# Altium footprint library Connectors_HS.PcbLib: 19 footprints (part 1 of 2)
Each footprint in its own frame and in the unit in brackets; x right, y up, seen from the top. Pads: shape width x height; smd on the part's side, far side on the other; paste and mask are expansions set on the pad; w line width, h text height; cw(c..) or ccw(c..) is an arc to the next point about the centre after c.
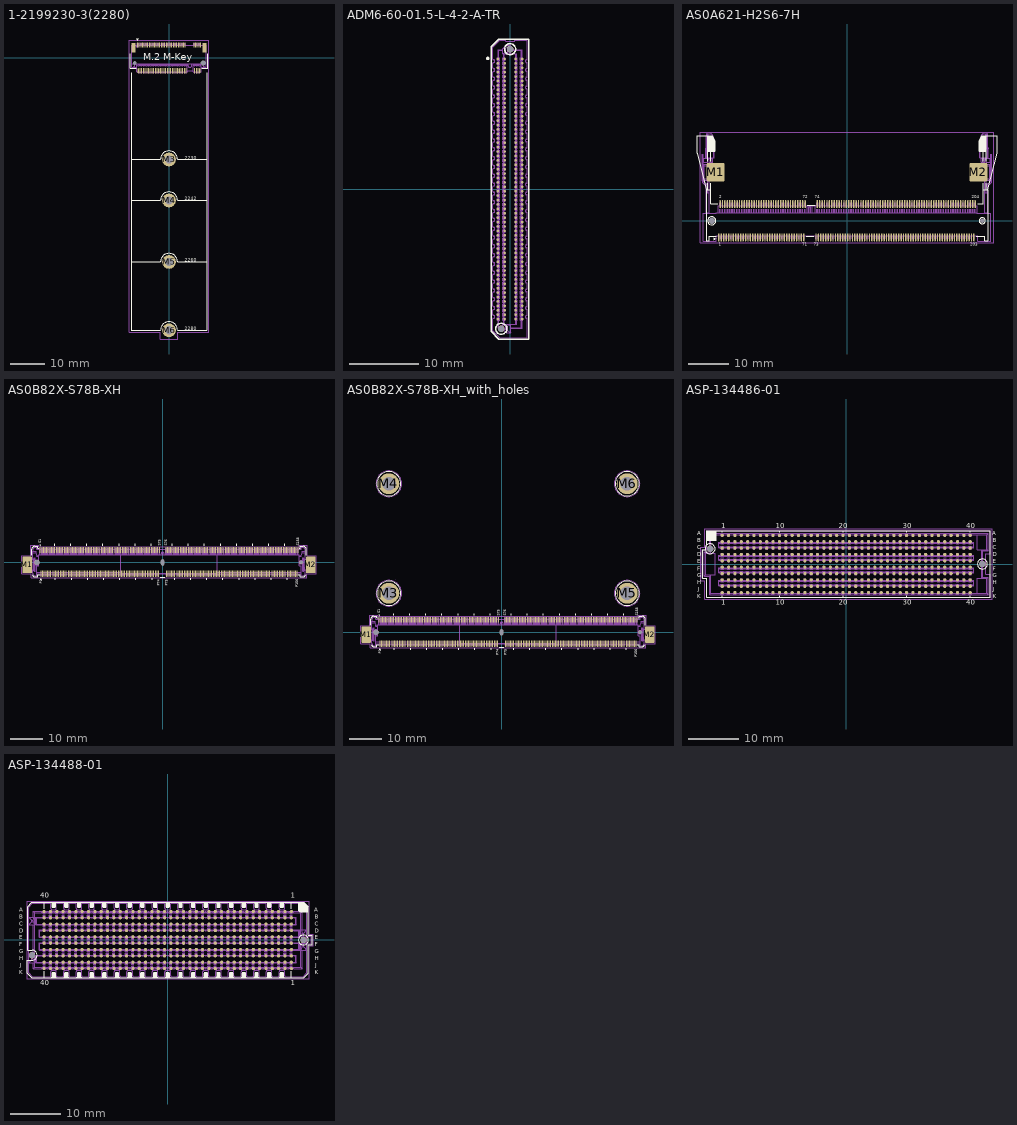
[diagram p0: the footprints below, top view; thin cyan lines are the x and y axes]

## 1-2199230-3(2280) [mm] "TE Conn M.2 M-Key"
height 4.2
pads (75):
  rect 0x0 hole 1.1 unplated paste-2539.97 mask+0.05: 0(-10,-1.5)
  rect 0x0 hole 1.6 unplated paste-2539.97 mask+0.05: 0(10,-1.5)
  rect 0.3x1.55 smd paste+0 mask+0.05: 1(-9.25,3.775)
  oval 0.3x1.55 smd paste+0 mask+0.05: 2(-9,-3.775) 3(-8.75,3.775) 4(-8.5,-3.775) 5(-8.25,3.775) 6(-8,-3.775) 7(-7.75,3.775) 8(-7.5,-3.775) 9(-7.25,3.775) 10(-7,-3.775) 11(-6.75,3.775) 12(-6.5,-3.775) 13(-6.25,3.775) 14(-6,-3.775) 15(-5.75,3.775) 16(-5.5,-3.775) 17(-5.25,3.775) 18(-5,-3.775) 19(-4.75,3.775) 20(-4.5,-3.775) 21(-4.25,3.775) 22(-4,-3.775) 23(-3.75,3.775) 24(-3.5,-3.775) 25(-3.25,3.775) 26(-3,-3.775) 27(-2.75,3.775) 28(-2.5,-3.775) 29(-2.25,3.775) 30(-2,-3.775) 31(-1.75,3.775) 32(-1.5,-3.775) 33(-1.25,3.775) 34(-1,-3.775) 35(-0.75,3.775) 36(-0.5,-3.775) 37(-0.25,3.775) 38(0,-3.775) 39(0.25,3.775) 40(0.5,-3.775) 41(0.75,3.775) 42(1,-3.775) 43(1.25,3.775) 44(1.5,-3.775) 45(1.75,3.775) 46(2,-3.775) 47(2.25,3.775) 48(2.5,-3.775) 49(2.75,3.775) 50(3,-3.775) 51(3.25,3.775) 52(3.5,-3.775) 53(3.75,3.775) 54(4,-3.775) 55(4.25,3.775) 56(4.5,-3.775) 57(4.75,3.775) 58(5,-3.775) 67(7.25,3.775) 68(7.5,-3.775) 69(7.75,3.775) 70(8,-3.775) 71(8.25,3.775) 72(8.5,-3.775) 73(8.75,3.775) 74(9,-3.775) 75(9.25,3.775)
  rect 1.2x2.75 smd paste+0 mask+0.05: M1(-10.35,3) M2(10.35,3)
  round 4 hole 2.4 paste-2539.97 mask+0.05: M3(0,-29.75) M4(0,-41.75) M5(0,-59.75) M6(0,-79.75)
Top Overlay:
  region: -9.25,5.025 -8.85,5.525 -9.65,5.525
  lines w0.2: -11.3,1.2 -11.3,-3.1 -9.6,-3.1 ; -11,-59.75 -2.5,-59.75 cw(c0,-59.75) 2.5,-59.75 11,-59.75 ; -11,-41.75 -2.5,-41.75 cw(c0,-41.75) 2.5,-41.75 11,-41.75 ; -11,-29.75 -2.5,-29.75 cw(c0,-29.75) 2.5,-29.75 11,-29.75 ; -11,-4.35 -11,-79.75 -2.5,-79.75 cw(c0,-79.75) 2.5,-79.75 11,-79.75 11,-4.35 ; 9.6,-3.1 11.3,-3.1 11.3,1.2
  text "2230" at 4.581,-29.754 h1
  text "2242" at 4.581,-41.754 h1
  text "2260" at 4.581,-59.754 h1
  text "2280" at 4.581,-79.754 h1
  text "M.2 M-Key" at -7.532,-0.667 h2
Top Courtyard:
  lines w0.025: -11.6,-80.3 -11.6,5.2 11.6,5.2 11.6,-80.3 2.5,-80.3 2.5,-82.3 -2.5,-82.3 -2.5,-80.3 -11.6,-80.3
Top Assembly:
  drawing of 494 lines, arcs and shapes, not listed
  text ".Designator" at -4.511,0.547 h2
3D body "1-2199230-3.x_t": height 4.09, standoff -0.62, extent -10.95,-4.35 10.95,4.35

## ADM6-60-01.5-L-4-2-A-TR [mm] "0.635 mm AcceleRate HD High-Density 4-Row Terminal"
height 2.9
pads (242):
  round 0.356 smd mask+0.05: A1(-1.75,18.732) A2(-1.75,18.098) A3(-1.75,17.462) A4(-1.75,16.828) A5(-1.75,16.192) A6(-1.75,15.557) A7(-1.75,14.922) A8(-1.75,14.287) A9(-1.75,13.652) A10(-1.75,13.018) A11(-1.75,12.383) A12(-1.75,11.747) A13(-1.75,11.112) A14(-1.75,10.477) A15(-1.75,9.842) A16(-1.75,9.207) A17(-1.75,8.572) A18(-1.75,7.938) A19(-1.75,7.302) A20(-1.75,6.667) A21(-1.75,6.032) A22(-1.75,5.397) A23(-1.75,4.763) A24(-1.75,4.127) A25(-1.75,3.492) A26(-1.75,2.857) A27(-1.75,2.222) A28(-1.75,1.587) A29(-1.75,0.953) A30(-1.75,0.318) A31(-1.75,-0.318) A32(-1.75,-0.953) A33(-1.75,-1.587) A34(-1.75,-2.222) A35(-1.75,-2.857) A36(-1.75,-3.492) A37(-1.75,-4.127) A38(-1.75,-4.763) A39(-1.75,-5.397) A40(-1.75,-6.032) A41(-1.75,-6.667) A42(-1.75,-7.302) A43(-1.75,-7.938) A44(-1.75,-8.572) A45(-1.75,-9.207) A46(-1.75,-9.842) A47(-1.75,-10.477) A48(-1.75,-11.112) A49(-1.75,-11.747) A50(-1.75,-12.383) A51(-1.75,-13.018) A52(-1.75,-13.652) A53(-1.75,-14.287) A54(-1.75,-14.922) A55(-1.75,-15.557) A56(-1.75,-16.192) A57(-1.75,-16.828) A58(-1.75,-17.462) A59(-1.75,-18.098) A60(-1.75,-18.732) B1(-0.79,18.732) B2(-0.79,18.098) B3(-0.79,17.462) B4(-0.79,16.828) B5(-0.79,16.192) B6(-0.79,15.557) B7(-0.79,14.922) B8(-0.79,14.287) B9(-0.79,13.652) B10(-0.79,13.018) B11(-0.79,12.383) B12(-0.79,11.747) B13(-0.79,11.112) B14(-0.79,10.477) B15(-0.79,9.842) B16(-0.79,9.207) B17(-0.79,8.572) B18(-0.79,7.938) B19(-0.79,7.302) B20(-0.79,6.667) B21(-0.79,6.032) B22(-0.79,5.397) B23(-0.79,4.763) B24(-0.79,4.127) B25(-0.79,3.492) B26(-0.79,2.857) B27(-0.79,2.222) B28(-0.79,1.587) B29(-0.79,0.953) B30(-0.79,0.318) B31(-0.79,-0.318) B32(-0.79,-0.953) B33(-0.79,-1.587) B34(-0.79,-2.222) B35(-0.79,-2.857) B36(-0.79,-3.492) B37(-0.79,-4.127) B38(-0.79,-4.763) B39(-0.79,-5.397) B40(-0.79,-6.032) B41(-0.79,-6.667) B42(-0.79,-7.302) B43(-0.79,-7.938) B44(-0.79,-8.572) B45(-0.79,-9.207) B46(-0.79,-9.842) B47(-0.79,-10.477) B48(-0.79,-11.112) B49(-0.79,-11.747) B50(-0.79,-12.383) B51(-0.79,-13.018) B52(-0.79,-13.652) B53(-0.79,-14.287) B54(-0.79,-14.922) B55(-0.79,-15.557) B56(-0.79,-16.192) B57(-0.79,-16.828) B58(-0.79,-17.462) B59(-0.79,-18.098) B60(-0.79,-18.732) C1(0.79,18.732) C2(0.79,18.098) C3(0.79,17.462) C4(0.79,16.828) C5(0.79,16.192) C6(0.79,15.557) C7(0.79,14.922) C8(0.79,14.287) C9(0.79,13.652) C10(0.79,13.018) C11(0.79,12.383) C12(0.79,11.747) C13(0.79,11.112) C14(0.79,10.477) C15(0.79,9.842) C16(0.79,9.207) C17(0.79,8.572) C18(0.79,7.938) C19(0.79,7.302) C20(0.79,6.667) C21(0.79,6.032) C22(0.79,5.397) C23(0.79,4.763) C24(0.79,4.127) C25(0.79,3.492) C26(0.79,2.857) C27(0.79,2.222) C28(0.79,1.587) C29(0.79,0.953) C30(0.79,0.318) C31(0.79,-0.318) C32(0.79,-0.953) C33(0.79,-1.587) C34(0.79,-2.222) C35(0.79,-2.857) C36(0.79,-3.492) C37(0.79,-4.127) C38(0.79,-4.763) C39(0.79,-5.397) C40(0.79,-6.032) C41(0.79,-6.667) C42(0.79,-7.302) C43(0.79,-7.938) C44(0.79,-8.572) C45(0.79,-9.207) C46(0.79,-9.842) C47(0.79,-10.477) C48(0.79,-11.112) C49(0.79,-11.747) C50(0.79,-12.383) C51(0.79,-13.018) C52(0.79,-13.652) C53(0.79,-14.287) C54(0.79,-14.922) C55(0.79,-15.557) C56(0.79,-16.192) C57(0.79,-16.828) C58(0.79,-17.462) C59(0.79,-18.098) C60(0.79,-18.732) D1(1.75,18.732) D2(1.75,18.098) D3(1.75,17.462) D4(1.75,16.828) D5(1.75,16.192) D6(1.75,15.557) D7(1.75,14.922) D8(1.75,14.287) D9(1.75,13.652) D10(1.75,13.018) D11(1.75,12.383) D12(1.75,11.747) D13(1.75,11.112) D14(1.75,10.477) D15(1.75,9.842) D16(1.75,9.207) D17(1.75,8.572) D18(1.75,7.938) D19(1.75,7.302) D20(1.75,6.667) D21(1.75,6.032) D22(1.75,5.397) D23(1.75,4.763) D24(1.75,4.127) D25(1.75,3.492) D26(1.75,2.857) D27(1.75,2.222) D28(1.75,1.587) D29(1.75,0.953) D30(1.75,0.318) D31(1.75,-0.318) D32(1.75,-0.953) D33(1.75,-1.587) D34(1.75,-2.222) D35(1.75,-2.857) D36(1.75,-3.492) D37(1.75,-4.127) D38(1.75,-4.763) D39(1.75,-5.397) D40(1.75,-6.032) D41(1.75,-6.667) D42(1.75,-7.302) D43(1.75,-7.938) D44(1.75,-8.572) D45(1.75,-9.207) D46(1.75,-9.842) D47(1.75,-10.477) D48(1.75,-11.112) D49(1.75,-11.747) D50(1.75,-12.383) D51(1.75,-13.018) D52(1.75,-13.652) D53(1.75,-14.287) D54(1.75,-14.922) D55(1.75,-15.557) D56(1.75,-16.192) D57(1.75,-16.828) D58(1.75,-17.462) D59(1.75,-18.098) D60(1.75,-18.732)
  round 0.95 hole 0.95 unplated: ""(-1.27,-20.135) ""(0,20.135)
Top Overlay:
  circle w0.2: c-1.27,-20.135 r0.8
  circle w0.2: c0,20.135 r0.8
  circle w0.3: c-3.2,18.8 r0.1
  lines w0.2: -2.7,-20.5 -2.7,20.503 -1.603,21.6 2.7,21.6 2.7,-21.6 -1.6,-21.6 -2.7,-20.5
Top Assembly:
  drawing of 3669 lines, arcs and shapes, not listed
  text ".Designator" at -3.047,-4.511 h2
3D body "ADM6-60-01.5-L-4-2-A-TR.x_t": height 4.1, standoff -0.67, extent -2.5,-21.41 2.5,21.41

## AS0A621-H2S6-7H [mm] "204-pin SO DIMM DDR3 Socket"
height 5.2
pads (208):
  rect 0.35x2 smd mask+0.05: 1(-31.65,-4.1)
  oval 0.35x2 smd mask+0.05: 2(-31.35,4.1) 3(-31.05,-4.1) 4(-30.75,4.1) 5(-30.45,-4.1) 6(-30.15,4.1) 7(-29.85,-4.1) 8(-29.55,4.1) 9(-29.25,-4.1) 10(-28.95,4.1) 11(-28.65,-4.1) 12(-28.35,4.1) 13(-28.05,-4.1) 14(-27.75,4.1) 15(-27.45,-4.1) 16(-27.15,4.1) 17(-26.85,-4.1) 18(-26.55,4.1) 19(-26.25,-4.1) 20(-25.95,4.1) 21(-25.65,-4.1) 22(-25.35,4.1) 23(-25.05,-4.1) 24(-24.75,4.1) 25(-24.45,-4.1) 26(-24.15,4.1) 27(-23.85,-4.1) 28(-23.55,4.1) 29(-23.25,-4.1) 30(-22.95,4.1) 31(-22.65,-4.1) 32(-22.35,4.1) 33(-22.05,-4.1) 34(-21.75,4.1) 35(-21.45,-4.1) 36(-21.15,4.1) 37(-20.85,-4.1) 38(-20.55,4.1) 39(-20.25,-4.1) 40(-19.95,4.1) 41(-19.65,-4.1) 42(-19.35,4.1) 43(-19.05,-4.1) 44(-18.75,4.1) 45(-18.45,-4.1) 46(-18.15,4.1) 47(-17.85,-4.1) 48(-17.55,4.1) 49(-17.25,-4.1) 50(-16.95,4.1) 51(-16.65,-4.1) 52(-16.35,4.1) 53(-16.05,-4.1) 54(-15.75,4.1) 55(-15.45,-4.1) 56(-15.15,4.1) 57(-14.85,-4.1) 58(-14.55,4.1) 59(-14.25,-4.1) 60(-13.95,4.1) 61(-13.65,-4.1) 62(-13.35,4.1) 63(-13.05,-4.1) 64(-12.75,4.1) 65(-12.45,-4.1) 66(-12.15,4.1) 67(-11.85,-4.1) 68(-11.55,4.1) 69(-11.25,-4.1) 70(-10.95,4.1) 71(-10.65,-4.1) 72(-10.35,4.1) 73(-7.65,-4.1) 74(-7.35,4.1) 75(-7.05,-4.1) 76(-6.75,4.1) 77(-6.45,-4.1) 78(-6.15,4.1) 79(-5.85,-4.1) 80(-5.55,4.1) 81(-5.25,-4.1) 82(-4.95,4.1) 83(-4.65,-4.1) 84(-4.35,4.1) 85(-4.05,-4.1) 86(-3.75,4.1) 87(-3.45,-4.1) 88(-3.15,4.1) 89(-2.85,-4.1) 90(-2.55,4.1) 91(-2.25,-4.1) 92(-1.95,4.1) 93(-1.65,-4.1) 94(-1.35,4.1) 95(-1.05,-4.1) 96(-0.75,4.1) 97(-0.45,-4.1) 98(-0.15,4.1) 99(0.15,-4.1) 100(0.45,4.1) 101(0.75,-4.1) 102(1.05,4.1) 103(1.35,-4.1) 104(1.65,4.1) 105(1.95,-4.1) 106(2.25,4.1) 107(2.55,-4.1) 108(2.85,4.1) 109(3.15,-4.1) 110(3.45,4.1) 111(3.75,-4.1) 112(4.05,4.1) 113(4.35,-4.1) 114(4.65,4.1) 115(4.95,-4.1) 116(5.25,4.1) 117(5.55,-4.1) 118(5.85,4.1) 119(6.15,-4.1) 120(6.45,4.1) 121(6.75,-4.1) 122(7.05,4.1) 123(7.35,-4.1) 124(7.65,4.1) 125(7.95,-4.1) 126(8.25,4.1) 127(8.55,-4.1) 128(8.85,4.1) 129(9.15,-4.1) 130(9.45,4.1) 131(9.75,-4.1) 132(10.05,4.1) 133(10.35,-4.1) 134(10.65,4.1) 135(10.95,-4.1) 136(11.25,4.1) 137(11.55,-4.1) 138(11.85,4.1) 139(12.15,-4.1) 140(12.45,4.1) 141(12.75,-4.1) 142(13.05,4.1) 143(13.35,-4.1) 144(13.65,4.1) 145(13.95,-4.1) 146(14.25,4.1) 147(14.55,-4.1) 148(14.85,4.1) 149(15.15,-4.1) 150(15.45,4.1) 151(15.75,-4.1) 152(16.05,4.1) 153(16.35,-4.1) 154(16.65,4.1) 155(16.95,-4.1) 156(17.25,4.1) 157(17.55,-4.1) 158(17.85,4.1) 159(18.15,-4.1) 160(18.45,4.1) 161(18.75,-4.1) 162(19.05,4.1) 163(19.35,-4.1) 164(19.65,4.1) 165(19.95,-4.1) 166(20.25,4.1) 167(20.55,-4.1) 168(20.85,4.1) 169(21.15,-4.1) 170(21.45,4.1) 171(21.75,-4.1) 172(22.05,4.1) 173(22.35,-4.1) 174(22.65,4.1) 175(22.95,-4.1) 176(23.25,4.1) 177(23.55,-4.1) 178(23.85,4.1) 179(24.15,-4.1) 180(24.45,4.1) 181(24.75,-4.1) 182(25.05,4.1) 183(25.35,-4.1) 184(25.65,4.1) 185(25.95,-4.1) 186(26.25,4.1) 187(26.55,-4.1) 188(26.85,4.1) 189(27.15,-4.1) 190(27.45,4.1) 191(27.75,-4.1) 192(28.05,4.1) 193(28.35,-4.1) 194(28.65,4.1) 195(28.95,-4.1) 196(29.25,4.1) 197(29.55,-4.1) 198(29.85,4.1) 199(30.15,-4.1) 200(30.45,4.1) 201(30.75,-4.1) 202(31.05,4.1) 203(31.35,-4.1) 204(31.65,4.1)
  round 0 hole 1.6 unplated: 14(-33.4,0)
  round 0 hole 1.1 unplated: 14(33.4,0)
  rrect20% 4.5x4.6 smd paste-3 mask+0.05: M1(-32.45,12) M2(32.45,12)
Top Overlay:
  circle w0.2: c33.4,0 r0.75
  circle w0.2: c-33.4,0 r1
  region: 34.345,21.05 34.345,17.2 32.702,17.2 32.702,19.66 33.25,21.05
  region: -34.346,21.05 -34.346,17.2 -32.703,17.2 -32.703,19.66 -33.25,21.05
  region: -32.35,-4.48 -32.95,-4.147 -32.95,-4.813
  lines w0.2: -34.346,7.65 -34.346,9.25 ; -34.346,14.74 -34.346,17.19 ; -33.63,9.25 -33.63,7.65 ; -33.63,14.75 -33.63,17.2 ; -32.25,-3.8 -34,-3.8 -34,-4.95 -34.8,-4.95 -34.8,7.65 ; -31.95,4.233 -33.63,4.233 -33.63,7.65 ; 31.95,-3.8 34,-3.805 ; 32.25,4.233 33.629,4.233 33.629,7.65 ; 33.629,9.25 33.629,7.65 ; 33.629,14.75 33.629,17.2 ; 34,-3.8 34,-4.95 34.8,-4.95 34.799,7.65 ; 34.345,7.65 34.345,9.25 ; 34.345,14.74 34.345,17.19 ; -34.8,7.65 -37.05,16.66 -37.05,21.05 -34.346,21.05 ; -34.8,7.65 -33.63,7.65 ; -34.346,21.05 -34.346,17.2 -32.695,17.2 -32.703,19.66 -33.25,21.05 -34.346,21.05 ; 33.629,7.65 34.8,7.65 ; 34.345,21.05 37.05,21.05 37.05,16.66 34.8,7.65 ; 34.345,21.05 34.345,17.2 32.695,17.2 32.702,19.66 33.25,21.05 34.345,21.05
  lines w0.254: -10.094,-3.867 -8.194,-3.867 ; -9.794,3.883 -7.894,3.883
  text "203" at 30.494,-6.23 h0.7
  text "73" at -8.195,-6.23 h0.7
  text "71" at -11.045,-6.23 h0.7
  text "1" at -31.733,-6.23 h0.7
  text "2" at -31.583,5.53 h0.7
  text "72" at -10.895,5.53 h0.7
  text "74" at -7.911,5.53 h0.7
  text "204" at 30.777,5.53 h0.7
Top Paste:
  region: -32.95,11.1 -32.95,10.1 -31.95,10.1 -31.95,11.1
  region: -34.35,11.1 -34.35,10.1 -33.35,10.1 -33.35,11.1
  region: -32.95,12.5 -32.95,11.5 -31.95,11.5 -31.95,12.5
  region: -34.35,12.5 -34.35,11.5 -33.35,11.5 -33.35,12.5
  rectangle: -32.95,12.9 -31.95,13.9
  rectangle: -34.35,12.9 -33.35,13.9
  region: -31.55,11.1 -31.55,10.1 -30.55,10.1 -30.55,11.1
  region: -31.55,12.5 -31.55,11.5 -30.55,11.5 -30.55,12.5
  rectangle: -31.55,12.9 -30.55,13.9
  region: 31.95,11.1 31.95,10.1 32.95,10.1 32.95,11.1
  region: 30.55,11.1 30.55,10.1 31.55,10.1 31.55,11.1
  region: 31.95,12.5 31.95,11.5 32.95,11.5 32.95,12.5
  region: 30.55,12.5 30.55,11.5 31.55,11.5 31.55,12.5
  rectangle: 31.95,12.9 32.95,13.9
  rectangle: 30.55,12.9 31.55,13.9
  region: 33.35,11.1 33.35,10.1 34.35,10.1 34.35,11.1
  region: 33.35,12.5 33.35,11.5 34.35,11.5 34.35,12.5
  rectangle: 33.35,12.9 34.35,13.9
Top Courtyard:
  lines w0.025: -36.2,-5.38 36.2,-5.38 36.2,21.92 -36.2,21.92 -36.2,-5.38
Top Assembly:
  drawing of 6500 lines, arcs and shapes, not listed
  text ".Designator" at -6.763,-1.409 h3
3D body "DDR3_SODIMM_2-2013289-1.x_t": height 5.5, standoff -0.65, extent -35.8,-5 35.8,21.54

## AS0B82X-S78B-XH [mm] "MXM3.0 Compatible Connector (SMARC 2.1)"
pads (319):
  round 1.6 hole 1.6 unplated paste-2539.97 mask+0: HOLE1(-39,0)
  oval 1x1.8 hole 1 slot 1.8 at 90 deg unplated paste-2539.97 mask+0: HOLE2(0,0)
  round 1.1 hole 1.1 unplated paste-2539.97 mask+0: HOLE3(43,0)
  rrect23% 3x5.15 smd paste-3 mask+0: M1(-42,-0.75) M2(46,-0.75)
  rect 0.3x2 smd paste-0.027 mask+0: P1(-37.75,-3.5)
  rrect50% 0.3x2 smd paste-0.027 mask+0: P2(-37.25,-3.5) P3(-36.75,-3.5) P4(-36.25,-3.5) P5(-35.75,-3.5) P6(-35.25,-3.5) P7(-34.75,-3.5) P8(-34.25,-3.5) P9(-33.75,-3.5) P10(-33.25,-3.5) P11(-32.75,-3.5) P12(-32.25,-3.5) P13(-31.75,-3.5) P14(-31.25,-3.5) P15(-30.75,-3.5) P16(-30.25,-3.5) P17(-29.75,-3.5) P18(-29.25,-3.5) P19(-28.75,-3.5) P20(-28.25,-3.5) P21(-27.75,-3.5) P22(-27.25,-3.5) P23(-26.75,-3.5) P24(-26.25,-3.5) P25(-25.75,-3.5) P26(-25.25,-3.5) P27(-24.75,-3.5) P28(-24.25,-3.5) P29(-23.75,-3.5) P30(-23.25,-3.5) P31(-22.75,-3.5) P32(-22.25,-3.5) P33(-21.75,-3.5) P34(-21.25,-3.5) P35(-20.75,-3.5) P36(-20.25,-3.5) P37(-19.75,-3.5) P38(-19.25,-3.5) P39(-18.75,-3.5) P40(-18.25,-3.5) P41(-17.75,-3.5) P42(-17.25,-3.5) P43(-16.75,-3.5) P44(-16.25,-3.5) P45(-15.75,-3.5) P46(-15.25,-3.5) P47(-14.75,-3.5) P48(-14.25,-3.5) P49(-13.75,-3.5) P50(-13.25,-3.5) P51(-12.75,-3.5) P52(-12.25,-3.5) P53(-11.75,-3.5) P54(-11.25,-3.5) P55(-10.75,-3.5) P56(-10.25,-3.5) P57(-9.75,-3.5) P58(-9.25,-3.5) P59(-8.75,-3.5) P60(-8.25,-3.5) P61(-7.75,-3.5) P62(-7.25,-3.5) P63(-6.75,-3.5) P64(-6.25,-3.5) P65(-5.75,-3.5) P66(-5.25,-3.5) P67(-4.75,-3.5) P68(-4.25,-3.5) P69(-3.75,-3.5) P70(-3.25,-3.5) P71(-2.75,-3.5) P72(-2.25,-3.5) P73(-1.75,-3.5) P74(-1.25,-3.5) P75(1.25,-3.5) P76(1.75,-3.5) P77(2.25,-3.5) P78(2.75,-3.5) P79(3.25,-3.5) P80(3.75,-3.5) P81(4.25,-3.5) P82(4.75,-3.5) P83(5.25,-3.5) P84(5.75,-3.5) P85(6.25,-3.5) P86(6.75,-3.5) P87(7.25,-3.5) P88(7.75,-3.5) P89(8.25,-3.5) P90(8.75,-3.5) P91(9.25,-3.5) P92(9.75,-3.5) P93(10.25,-3.5) P94(10.75,-3.5) P95(11.25,-3.5) P96(11.75,-3.5) P97(12.25,-3.5) P98(12.75,-3.5) P99(13.25,-3.5) P100(13.75,-3.5) P101(14.25,-3.5) P102(14.75,-3.5) P103(15.25,-3.5) P104(15.75,-3.5) P105(16.25,-3.5) P106(16.75,-3.5) P107(17.25,-3.5) P108(17.75,-3.5) P109(18.25,-3.5) P110(18.75,-3.5) P111(19.25,-3.5) P112(19.75,-3.5) P113(20.25,-3.5) P114(20.75,-3.5) P115(21.25,-3.5) P116(21.75,-3.5) P117(22.25,-3.5) P118(22.75,-3.5) P119(23.25,-3.5) P120(23.75,-3.5) P121(24.25,-3.5) P122(24.75,-3.5) P123(25.25,-3.5) P124(25.75,-3.5) P125(26.25,-3.5) P126(26.75,-3.5) P127(27.25,-3.5) P128(27.75,-3.5) P129(28.25,-3.5) P130(28.75,-3.5) P131(29.25,-3.5) P132(29.75,-3.5) P133(30.25,-3.5) P134(30.75,-3.5) P135(31.25,-3.5) P136(31.75,-3.5) P137(32.25,-3.5) P138(32.75,-3.5) P139(33.25,-3.5) P140(33.75,-3.5) P141(34.25,-3.5) P142(34.75,-3.5) P143(35.25,-3.5) P144(35.75,-3.5) P145(36.25,-3.5) P146(36.75,-3.5) P147(37.25,-3.5) P148(37.75,-3.5) P149(38.25,-3.5) P150(38.75,-3.5) P151(39.25,-3.5) P152(39.75,-3.5) P153(40.25,-3.5) P154(40.75,-3.5) P155(41.25,-3.5) P156(41.75,-3.5)
  rect 0.3x1.75 smd paste-0.026 mask+0: S1(-38,3.875)
  rrect50% 0.3x1.75 smd paste-0.026 mask+0: S2(-37.5,3.875) S3(-37,3.875) S4(-36.5,3.875) S5(-36,3.875) S6(-35.5,3.875) S7(-35,3.875) S8(-34.5,3.875) S9(-34,3.875) S10(-33.5,3.875) S11(-33,3.875) S12(-32.5,3.875) S13(-32,3.875) S14(-31.5,3.875) S15(-31,3.875) S16(-30.5,3.875) S17(-30,3.875) S18(-29.5,3.875) S19(-29,3.875) S20(-28.5,3.875) S21(-28,3.875) S22(-27.5,3.875) S23(-27,3.875) S24(-26.5,3.875) S25(-26,3.875) S26(-25.5,3.875) S27(-25,3.875) S28(-24.5,3.875) S29(-24,3.875) S30(-23.5,3.875) S31(-23,3.875) S32(-22.5,3.875) S33(-22,3.875) S34(-21.5,3.875) S35(-21,3.875) S36(-20.5,3.875) S37(-20,3.875) S38(-19.5,3.875) S39(-19,3.875) S40(-18.5,3.875) S41(-18,3.875) S42(-17.5,3.875) S43(-17,3.875) S44(-16.5,3.875) S45(-16,3.875) S46(-15.5,3.875) S47(-15,3.875) S48(-14.5,3.875) S49(-14,3.875) S50(-13.5,3.875) S51(-13,3.875) S52(-12.5,3.875) S53(-12,3.875) S54(-11.5,3.875) S55(-11,3.875) S56(-10.5,3.875) S57(-10,3.875) S58(-9.5,3.875) S59(-9,3.875) S60(-8.5,3.875) S61(-8,3.875) S62(-7.5,3.875) S63(-7,3.875) S64(-6.5,3.875) S65(-6,3.875) S66(-5.5,3.875) S67(-5,3.875) S68(-4.5,3.875) S69(-4,3.875) S70(-3.5,3.875) S71(-3,3.875) S72(-2.5,3.875) S73(-2,3.875) S74(-1.5,3.875) S75(-1,3.875) S76(1,3.875) S77(1.5,3.875) S78(2,3.875) S79(2.5,3.875) S80(3,3.875) S81(3.5,3.875) S82(4,3.875) S83(4.5,3.875) S84(5,3.875) S85(5.5,3.875) S86(6,3.875) S87(6.5,3.875) S88(7,3.875) S89(7.5,3.875) S90(8,3.875) S91(8.5,3.875) S92(9,3.875) S93(9.5,3.875) S94(10,3.875) S95(10.5,3.875) S96(11,3.875) S97(11.5,3.875) S98(12,3.875) S99(12.5,3.875) S100(13,3.875) S101(13.5,3.875) S102(14,3.875) S103(14.5,3.875) S104(15,3.875) S105(15.5,3.875) S106(16,3.875) S107(16.5,3.875) S108(17,3.875) S109(17.5,3.875) S110(18,3.875) S111(18.5,3.875) S112(19,3.875) S113(19.5,3.875) S114(20,3.875) S115(20.5,3.875) S116(21,3.875) S117(21.5,3.875) S118(22,3.875) S119(22.5,3.875) S120(23,3.875) S121(23.5,3.875) S122(24,3.875) S123(24.5,3.875) S124(25,3.875) S125(25.5,3.875) S126(26,3.875) S127(26.5,3.875) S128(27,3.875) S129(27.5,3.875) S130(28,3.875) S131(28.5,3.875) S132(29,3.875) S133(29.5,3.875) S134(30,3.875) S135(30.5,3.875) S136(31,3.875) S137(31.5,3.875) S138(32,3.875) S139(32.5,3.875) S140(33,3.875) S141(33.5,3.875) S142(34,3.875) S143(34.5,3.875) S144(35,3.875) S145(35.5,3.875) S146(36,3.875) S147(36.5,3.875) S148(37,3.875) S149(37.5,3.875) S150(38,3.875) S151(38.5,3.875) S152(39,3.875) S153(39.5,3.875) S154(40,3.875) S155(40.5,3.875) S156(41,3.875) S157(41.5,3.875) S158(42,3.875)
Top Overlay:
  region: -37.75,-4.925 -37.55,-5.375 -37.95,-5.375
  region: -38,4.975 -37.8,5.425 -38.2,5.425
  lines w0.2: -40.6,2.25 -40.6,4.07 cw(c-39.65,4.07) -39.65,5.02 -38.8,5.02 -38.8,4.45 -38.45,4.45 ; -40.443,-3.875 ccw(c-39.55,-3.55) -39.55,-4.5 -38.8,-4.5 -38.8,-3.8 -38.2,-3.8 ; -33.5,5.25 -33.5,5.75 ; -33.25,-5.375 -33.25,-4.875 ; -28.5,5.25 -28.5,5.75 ; -28.25,-5.375 -28.25,-4.875 ; -23.5,5.25 -23.5,5.75 ; -23.25,-5.375 -23.25,-4.875 ; -18.5,5.25 -18.5,5.75 ; -18.25,-5.375 -18.25,-4.875 ; -13.5,5.25 -13.5,5.75 ; -13.25,-5.375 -13.25,-4.875 ; -8.5,5.25 -8.5,5.75 ; -8.25,-5.375 -8.25,-4.875 ; -3.5,5.25 -3.5,5.75 ; -3.25,-5.375 -3.25,-4.875 ; -0.725,-4.6 0.725,-4.6 ; 3,5.25 3,5.75 ; 3.75,-5.375 3.75,-4.875 ; 8,5.25 8,5.75 ; 8.75,-5.375 8.75,-4.875 ; 13,5.25 13,5.75 ; 13.75,-5.375 13.75,-4.875 ; 18,5.25 18,5.75 ; 18.75,-5.375 18.75,-4.875 ; 23,5.25 23,5.75 ; 23.75,-5.375 23.75,-4.875 ; 28,5.25 28,5.75 ; 28.75,-5.375 28.75,-4.875 ; 33,5.25 33,5.75 ; 33.75,-5.375 33.75,-4.875 ; 38,5.25 38,5.75 ; 38.75,-5.375 38.75,-4.875 ; 42.2,-3.8 42.8,-3.8 42.8,-4.5 43.55,-4.5 ccw(c43.55,-3.55) 44.443,-3.875 ; 42.45,4.45 42.8,4.45 42.8,5.02 43.65,5.02 cw(c43.65,4.07) 44.6,4.07 44.6,2.25
  text "P156" at 42.15,-7.706 h0.8
  text "P75" at 1.65,-7.158 h0.8
  text "P74" at -0.85,-7.196 h0.8
  text "P1" at -37.35,-6.603 h0.8
  text "S1" at -37.6,5.95 h0.8
  text "S75" at -0.6,5.2 h0.8
  text "S76" at 1.4,5.2 h0.8
  text "S158" at 42.4,5.2 h0.8
Top Paste:
  rectangle: -43.35,-0.6 -42.15,1.65
  region: -40.65,1.65 -41.85,1.65 -41.85,-0.6 -40.65,-0.6
  rectangle: -43.35,-3.15 -42.15,-0.9
  region: -40.65,-0.9 -41.85,-0.9 -41.85,-3.15 -40.65,-3.15
  rectangle: 44.65,-0.6 45.85,1.65
  region: 47.35,1.65 46.15,1.65 46.15,-0.6 47.35,-0.6
  rectangle: 44.65,-3.15 45.85,-0.9
  region: 47.35,-0.9 46.15,-0.9 46.15,-3.15 47.35,-3.15
Top Courtyard:
  lines w0.025: -43.7,-3.55 -40.75,-3.55 -40.75,-4.8 44.75,-4.8 44.75,-3.55 47.7,-3.55 47.7,2.05 44.9,2.05 44.9,5.3 42.5,5.3 42.5,4.95 -38.5,4.95 -38.5,5.3 -40.9,5.3 -40.9,2.05 -43.7,2.05 -43.7,-3.55
Top Assembly:
  drawing of 2651 lines, arcs and shapes, not listed
  text ".Designator" at -11.274,-1.132 h5
3D body "AS0B82X-S78B-XH_317-0000-1969-C-3D.x_t": height 7.76, standoff -0.59, extent -42.44,-4.2 46.44,4.7

## AS0B82X-S78B-XH_with_holes [mm] "MXM3.0 Compatible Connector (SMARC 2.1)"
pads (323):
  round 1.6 hole 1.6 unplated paste-2539.97 mask+0: HOLE1(-39,0)
  oval 1x1.8 hole 1 slot 1.8 at 90 deg unplated paste-2539.97 mask+0: HOLE2(0,0)
  round 1.1 hole 1.1 unplated paste-2539.97 mask+0: HOLE3(43,0)
  rrect23% 3x5.15 smd paste-3 mask+0: M1(-42,-0.75) M2(46,-0.75)
  round 6.5 hole 4.33 paste-2539.97 mask+0.05: M3(-35,12.13) M4(-35,46.13) M5(39,12.13) M6(39,46.13)
  rect 0.3x2 smd paste-0.027 mask+0: P1(-37.75,-3.5)
  rrect50% 0.3x2 smd paste-0.027 mask+0: P2(-37.25,-3.5) P3(-36.75,-3.5) P4(-36.25,-3.5) P5(-35.75,-3.5) P6(-35.25,-3.5) P7(-34.75,-3.5) P8(-34.25,-3.5) P9(-33.75,-3.5) P10(-33.25,-3.5) P11(-32.75,-3.5) P12(-32.25,-3.5) P13(-31.75,-3.5) P14(-31.25,-3.5) P15(-30.75,-3.5) P16(-30.25,-3.5) P17(-29.75,-3.5) P18(-29.25,-3.5) P19(-28.75,-3.5) P20(-28.25,-3.5) P21(-27.75,-3.5) P22(-27.25,-3.5) P23(-26.75,-3.5) P24(-26.25,-3.5) P25(-25.75,-3.5) P26(-25.25,-3.5) P27(-24.75,-3.5) P28(-24.25,-3.5) P29(-23.75,-3.5) P30(-23.25,-3.5) P31(-22.75,-3.5) P32(-22.25,-3.5) P33(-21.75,-3.5) P34(-21.25,-3.5) P35(-20.75,-3.5) P36(-20.25,-3.5) P37(-19.75,-3.5) P38(-19.25,-3.5) P39(-18.75,-3.5) P40(-18.25,-3.5) P41(-17.75,-3.5) P42(-17.25,-3.5) P43(-16.75,-3.5) P44(-16.25,-3.5) P45(-15.75,-3.5) P46(-15.25,-3.5) P47(-14.75,-3.5) P48(-14.25,-3.5) P49(-13.75,-3.5) P50(-13.25,-3.5) P51(-12.75,-3.5) P52(-12.25,-3.5) P53(-11.75,-3.5) P54(-11.25,-3.5) P55(-10.75,-3.5) P56(-10.25,-3.5) P57(-9.75,-3.5) P58(-9.25,-3.5) P59(-8.75,-3.5) P60(-8.25,-3.5) P61(-7.75,-3.5) P62(-7.25,-3.5) P63(-6.75,-3.5) P64(-6.25,-3.5) P65(-5.75,-3.5) P66(-5.25,-3.5) P67(-4.75,-3.5) P68(-4.25,-3.5) P69(-3.75,-3.5) P70(-3.25,-3.5) P71(-2.75,-3.5) P72(-2.25,-3.5) P73(-1.75,-3.5) P74(-1.25,-3.5) P75(1.25,-3.5) P76(1.75,-3.5) P77(2.25,-3.5) P78(2.75,-3.5) P79(3.25,-3.5) P80(3.75,-3.5) P81(4.25,-3.5) P82(4.75,-3.5) P83(5.25,-3.5) P84(5.75,-3.5) P85(6.25,-3.5) P86(6.75,-3.5) P87(7.25,-3.5) P88(7.75,-3.5) P89(8.25,-3.5) P90(8.75,-3.5) P91(9.25,-3.5) P92(9.75,-3.5) P93(10.25,-3.5) P94(10.75,-3.5) P95(11.25,-3.5) P96(11.75,-3.5) P97(12.25,-3.5) P98(12.75,-3.5) P99(13.25,-3.5) P100(13.75,-3.5) P101(14.25,-3.5) P102(14.75,-3.5) P103(15.25,-3.5) P104(15.75,-3.5) P105(16.25,-3.5) P106(16.75,-3.5) P107(17.25,-3.5) P108(17.75,-3.5) P109(18.25,-3.5) P110(18.75,-3.5) P111(19.25,-3.5) P112(19.75,-3.5) P113(20.25,-3.5) P114(20.75,-3.5) P115(21.25,-3.5) P116(21.75,-3.5) P117(22.25,-3.5) P118(22.75,-3.5) P119(23.25,-3.5) P120(23.75,-3.5) P121(24.25,-3.5) P122(24.75,-3.5) P123(25.25,-3.5) P124(25.75,-3.5) P125(26.25,-3.5) P126(26.75,-3.5) P127(27.25,-3.5) P128(27.75,-3.5) P129(28.25,-3.5) P130(28.75,-3.5) P131(29.25,-3.5) P132(29.75,-3.5) P133(30.25,-3.5) P134(30.75,-3.5) P135(31.25,-3.5) P136(31.75,-3.5) P137(32.25,-3.5) P138(32.75,-3.5) P139(33.25,-3.5) P140(33.75,-3.5) P141(34.25,-3.5) P142(34.75,-3.5) P143(35.25,-3.5) P144(35.75,-3.5) P145(36.25,-3.5) P146(36.75,-3.5) P147(37.25,-3.5) P148(37.75,-3.5) P149(38.25,-3.5) P150(38.75,-3.5) P151(39.25,-3.5) P152(39.75,-3.5) P153(40.25,-3.5) P154(40.75,-3.5) P155(41.25,-3.5) P156(41.75,-3.5)
  rect 0.3x1.75 smd paste-0.026 mask+0: S1(-38,3.875)
  rrect50% 0.3x1.75 smd paste-0.026 mask+0: S2(-37.5,3.875) S3(-37,3.875) S4(-36.5,3.875) S5(-36,3.875) S6(-35.5,3.875) S7(-35,3.875) S8(-34.5,3.875) S9(-34,3.875) S10(-33.5,3.875) S11(-33,3.875) S12(-32.5,3.875) S13(-32,3.875) S14(-31.5,3.875) S15(-31,3.875) S16(-30.5,3.875) S17(-30,3.875) S18(-29.5,3.875) S19(-29,3.875) S20(-28.5,3.875) S21(-28,3.875) S22(-27.5,3.875) S23(-27,3.875) S24(-26.5,3.875) S25(-26,3.875) S26(-25.5,3.875) S27(-25,3.875) S28(-24.5,3.875) S29(-24,3.875) S30(-23.5,3.875) S31(-23,3.875) S32(-22.5,3.875) S33(-22,3.875) S34(-21.5,3.875) S35(-21,3.875) S36(-20.5,3.875) S37(-20,3.875) S38(-19.5,3.875) S39(-19,3.875) S40(-18.5,3.875) S41(-18,3.875) S42(-17.5,3.875) S43(-17,3.875) S44(-16.5,3.875) S45(-16,3.875) S46(-15.5,3.875) S47(-15,3.875) S48(-14.5,3.875) S49(-14,3.875) S50(-13.5,3.875) S51(-13,3.875) S52(-12.5,3.875) S53(-12,3.875) S54(-11.5,3.875) S55(-11,3.875) S56(-10.5,3.875) S57(-10,3.875) S58(-9.5,3.875) S59(-9,3.875) S60(-8.5,3.875) S61(-8,3.875) S62(-7.5,3.875) S63(-7,3.875) S64(-6.5,3.875) S65(-6,3.875) S66(-5.5,3.875) S67(-5,3.875) S68(-4.5,3.875) S69(-4,3.875) S70(-3.5,3.875) S71(-3,3.875) S72(-2.5,3.875) S73(-2,3.875) S74(-1.5,3.875) S75(-1,3.875) S76(1,3.875) S77(1.5,3.875) S78(2,3.875) S79(2.5,3.875) S80(3,3.875) S81(3.5,3.875) S82(4,3.875) S83(4.5,3.875) S84(5,3.875) S85(5.5,3.875) S86(6,3.875) S87(6.5,3.875) S88(7,3.875) S89(7.5,3.875) S90(8,3.875) S91(8.5,3.875) S92(9,3.875) S93(9.5,3.875) S94(10,3.875) S95(10.5,3.875) S96(11,3.875) S97(11.5,3.875) S98(12,3.875) S99(12.5,3.875) S100(13,3.875) S101(13.5,3.875) S102(14,3.875) S103(14.5,3.875) S104(15,3.875) S105(15.5,3.875) S106(16,3.875) S107(16.5,3.875) S108(17,3.875) S109(17.5,3.875) S110(18,3.875) S111(18.5,3.875) S112(19,3.875) S113(19.5,3.875) S114(20,3.875) S115(20.5,3.875) S116(21,3.875) S117(21.5,3.875) S118(22,3.875) S119(22.5,3.875) S120(23,3.875) S121(23.5,3.875) S122(24,3.875) S123(24.5,3.875) S124(25,3.875) S125(25.5,3.875) S126(26,3.875) S127(26.5,3.875) S128(27,3.875) S129(27.5,3.875) S130(28,3.875) S131(28.5,3.875) S132(29,3.875) S133(29.5,3.875) S134(30,3.875) S135(30.5,3.875) S136(31,3.875) S137(31.5,3.875) S138(32,3.875) S139(32.5,3.875) S140(33,3.875) S141(33.5,3.875) S142(34,3.875) S143(34.5,3.875) S144(35,3.875) S145(35.5,3.875) S146(36,3.875) S147(36.5,3.875) S148(37,3.875) S149(37.5,3.875) S150(38,3.875) S151(38.5,3.875) S152(39,3.875) S153(39.5,3.875) S154(40,3.875) S155(40.5,3.875) S156(41,3.875) S157(41.5,3.875) S158(42,3.875)
Top Overlay:
  circle w0.2: c-35,12.13 r3.75
  circle w0.2: c-35,46.13 r3.75
  circle w0.2: c39,46.13 r3.75
  circle w0.2: c39,12.13 r3.75
  region: -38,4.975 -37.8,5.425 -38.2,5.425
  region: -37.75,-4.925 -37.55,-5.375 -37.95,-5.375
  lines w0.2: -40.6,2.25 -40.6,4.07 cw(c-39.65,4.07) -39.65,5.02 -38.8,5.02 -38.8,4.45 -38.45,4.45 ; -40.443,-3.875 ccw(c-39.55,-3.55) -39.55,-4.5 -38.8,-4.5 -38.8,-3.8 -38.2,-3.8 ; -33.5,5.25 -33.5,5.75 ; -33.25,-5.375 -33.25,-4.875 ; -28.5,5.25 -28.5,5.75 ; -28.25,-5.375 -28.25,-4.875 ; -23.5,5.25 -23.5,5.75 ; -23.25,-5.375 -23.25,-4.875 ; -18.5,5.25 -18.5,5.75 ; -18.25,-5.375 -18.25,-4.875 ; -13.5,5.25 -13.5,5.75 ; -13.25,-5.375 -13.25,-4.875 ; -8.5,5.25 -8.5,5.75 ; -8.25,-5.375 -8.25,-4.875 ; -3.5,5.25 -3.5,5.75 ; -3.25,-5.375 -3.25,-4.875 ; -0.725,-4.6 0.725,-4.6 ; 3,5.25 3,5.75 ; 3.75,-5.375 3.75,-4.875 ; 8,5.25 8,5.75 ; 8.75,-5.375 8.75,-4.875 ; 13,5.25 13,5.75 ; 13.75,-5.375 13.75,-4.875 ; 18,5.25 18,5.75 ; 18.75,-5.375 18.75,-4.875 ; 23,5.25 23,5.75 ; 23.75,-5.375 23.75,-4.875 ; 28,5.25 28,5.75 ; 28.75,-5.375 28.75,-4.875 ; 33,5.25 33,5.75 ; 33.75,-5.375 33.75,-4.875 ; 38,5.25 38,5.75 ; 38.75,-5.375 38.75,-4.875 ; 42.2,-3.8 42.8,-3.8 42.8,-4.5 43.55,-4.5 ccw(c43.55,-3.55) 44.443,-3.875 ; 42.45,4.45 42.8,4.45 42.8,5.02 43.65,5.02 cw(c43.65,4.07) 44.6,4.07 44.6,2.25
  text "S158" at 42.4,5.2 h0.8
  text "S76" at 1.4,5.2 h0.8
  text "S75" at -0.6,5.2 h0.8
  text "S1" at -37.6,5.95 h0.8
  text "P1" at -37.35,-6.603 h0.8
  text "P74" at -0.85,-7.196 h0.8
  text "P75" at 1.65,-7.158 h0.8
  text "P156" at 42.15,-7.706 h0.8
Top Paste:
  region: 47.35,-0.9 46.15,-0.9 46.15,-3.15 47.35,-3.15
  rectangle: 44.65,-3.15 45.85,-0.9
  region: 47.35,1.65 46.15,1.65 46.15,-0.6 47.35,-0.6
  rectangle: 44.65,-0.6 45.85,1.65
  region: -40.65,-0.9 -41.85,-0.9 -41.85,-3.15 -40.65,-3.15
  rectangle: -43.35,-3.15 -42.15,-0.9
  region: -40.65,1.65 -41.85,1.65 -41.85,-0.6 -40.65,-0.6
  rectangle: -43.35,-0.6 -42.15,1.65
Top Courtyard:
  circle w0.025: c-35,12.13 r4
  circle w0.025: c-35,46.13 r4
  circle w0.025: c39,46.13 r4
  circle w0.025: c39,12.13 r4
  lines w0.025: -43.7,-3.55 -40.75,-3.55 -40.75,-4.8 44.75,-4.8 44.75,-3.55 47.7,-3.55 47.7,2.05 44.9,2.05 44.9,5.3 42.5,5.3 42.5,4.95 -38.5,4.95 -38.5,5.3 -40.9,5.3 -40.9,2.05 -43.7,2.05 -43.7,-3.55
Top Assembly:
  drawing of 2664 lines, arcs and shapes, not listed
  text ".Designator" at -11.274,-1.132 h5
3D body "AS0B82X-S78B-XH_317-0000-1969-C-3D.x_t": height 7.76, standoff -0.59, extent -42.44,-4.2 46.44,4.7

## ASP-134486-01 [mm] "VITA57 FMC Connector, HPC"
height 7.57
pads (402):
  round 0.64 smd mask+0.05: A1(-24.765,5.715) A2(-23.495,5.715) A3(-22.225,5.715) A4(-20.955,5.715) A5(-19.685,5.715) A6(-18.415,5.715) A7(-17.145,5.715) A8(-15.875,5.715) A9(-14.605,5.715) A10(-13.335,5.715) A11(-12.065,5.715) A12(-10.795,5.715) A13(-9.525,5.715) A14(-8.255,5.715) A15(-6.985,5.715) A16(-5.715,5.715) A17(-4.445,5.715) A18(-3.175,5.715) A19(-1.905,5.715) A20(-0.635,5.715) A21(0.635,5.715) A22(1.905,5.715) A23(3.175,5.715) A24(4.445,5.715) A25(5.715,5.715) A26(6.985,5.715) A27(8.255,5.715) A28(9.525,5.715) A29(10.795,5.715) A30(12.065,5.715) A31(13.335,5.715) A32(14.605,5.715) A33(15.875,5.715) A34(17.145,5.715) A35(18.415,5.715) A36(19.685,5.715) A37(20.955,5.715) A38(22.225,5.715) A39(23.495,5.715) A40(24.765,5.715) B1(-24.765,4.445) B2(-23.495,4.445) B3(-22.225,4.445) B4(-20.955,4.445) B5(-19.685,4.445) B6(-18.415,4.445) B7(-17.145,4.445) B8(-15.875,4.445) B9(-14.605,4.445) B10(-13.335,4.445) B11(-12.065,4.445) B12(-10.795,4.445) B13(-9.525,4.445) B14(-8.255,4.445) B15(-6.985,4.445) B16(-5.715,4.445) B17(-4.445,4.445) B18(-3.175,4.445) B19(-1.905,4.445) B20(-0.635,4.445) B21(0.635,4.445) B22(1.905,4.445) B23(3.175,4.445) B24(4.445,4.445) B25(5.715,4.445) B26(6.985,4.445) B27(8.255,4.445) B28(9.525,4.445) B29(10.795,4.445) B30(12.065,4.445) B31(13.335,4.445) B32(14.605,4.445) B33(15.875,4.445) B34(17.145,4.445) B35(18.415,4.445) B36(19.685,4.445) B37(20.955,4.445) B38(22.225,4.445) B39(23.495,4.445) B40(24.765,4.445) C1(-24.765,3.175) C2(-23.495,3.175) C3(-22.225,3.175) C4(-20.955,3.175) C5(-19.685,3.175) C6(-18.415,3.175) C7(-17.145,3.175) C8(-15.875,3.175) C9(-14.605,3.175) C10(-13.335,3.175) C11(-12.065,3.175) C12(-10.795,3.175) C13(-9.525,3.175) C14(-8.255,3.175) C15(-6.985,3.175) C16(-5.715,3.175) C17(-4.445,3.175) C18(-3.175,3.175) C19(-1.905,3.175) C20(-0.635,3.175) C21(0.635,3.175) C22(1.905,3.175) C23(3.175,3.175) C24(4.445,3.175) C25(5.715,3.175) C26(6.985,3.175) C27(8.255,3.175) C28(9.525,3.175) C29(10.795,3.175) C30(12.065,3.175) C31(13.335,3.175) C32(14.605,3.175) C33(15.875,3.175) C34(17.145,3.175) C35(18.415,3.175) C36(19.685,3.175) C37(20.955,3.175) C38(22.225,3.175) C39(23.495,3.175) C40(24.765,3.175) D1(-24.765,1.905) D2(-23.495,1.905) D3(-22.225,1.905) D4(-20.955,1.905) D5(-19.685,1.905) D6(-18.415,1.905) D7(-17.145,1.905) D8(-15.875,1.905) D9(-14.605,1.905) D10(-13.335,1.905) D11(-12.065,1.905) D12(-10.795,1.905) D13(-9.525,1.905) D14(-8.255,1.905) D15(-6.985,1.905) D16(-5.715,1.905) D17(-4.445,1.905) D18(-3.175,1.905) D19(-1.905,1.905) D20(-0.635,1.905) D21(0.635,1.905) D22(1.905,1.905) D23(3.175,1.905) D24(4.445,1.905) D25(5.715,1.905) D26(6.985,1.905) D27(8.255,1.905) D28(9.525,1.905) D29(10.795,1.905) D30(12.065,1.905) D31(13.335,1.905) D32(14.605,1.905) D33(15.875,1.905) D34(17.145,1.905) D35(18.415,1.905) D36(19.685,1.905) D37(20.955,1.905) D38(22.225,1.905) D39(23.495,1.905) D40(24.765,1.905) E1(-24.765,0.635) E2(-23.495,0.635) E3(-22.225,0.635) E4(-20.955,0.635) E5(-19.685,0.635) E6(-18.415,0.635) E7(-17.145,0.635) E8(-15.875,0.635) E9(-14.605,0.635) E10(-13.335,0.635) E11(-12.065,0.635) E12(-10.795,0.635) E13(-9.525,0.635) E14(-8.255,0.635) E15(-6.985,0.635) E16(-5.715,0.635) E17(-4.445,0.635) E18(-3.175,0.635) E19(-1.905,0.635) E20(-0.635,0.635) E21(0.635,0.635) E22(1.905,0.635) E23(3.175,0.635) E24(4.445,0.635) E25(5.715,0.635) E26(6.985,0.635) E27(8.255,0.635) E28(9.525,0.635) E29(10.795,0.635) E30(12.065,0.635) E31(13.335,0.635) E32(14.605,0.635) E33(15.875,0.635) E34(17.145,0.635) E35(18.415,0.635) E36(19.685,0.635) E37(20.955,0.635) E38(22.225,0.635) E39(23.495,0.635) E40(24.765,0.635) F1(-24.765,-0.635) F2(-23.495,-0.635) F3(-22.225,-0.635) F4(-20.955,-0.635) F5(-19.685,-0.635) F6(-18.415,-0.635) F7(-17.145,-0.635) F8(-15.875,-0.635) F9(-14.605,-0.635) F10(-13.335,-0.635) F11(-12.065,-0.635) F12(-10.795,-0.635) F13(-9.525,-0.635) F14(-8.255,-0.635) F15(-6.985,-0.635) F16(-5.715,-0.635) F17(-4.445,-0.635) F18(-3.175,-0.635) F19(-1.905,-0.635) F20(-0.635,-0.635) F21(0.635,-0.635) F22(1.905,-0.635) F23(3.175,-0.635) F24(4.445,-0.635) F25(5.715,-0.635) F26(6.985,-0.635) F27(8.255,-0.635) F28(9.525,-0.635) F29(10.795,-0.635) F30(12.065,-0.635) F31(13.335,-0.635) F32(14.605,-0.635) F33(15.875,-0.635) F34(17.145,-0.635) F35(18.415,-0.635) F36(19.685,-0.635) F37(20.955,-0.635) F38(22.225,-0.635) F39(23.495,-0.635) F40(24.765,-0.635) G1(-24.765,-1.905) G2(-23.495,-1.905) G3(-22.225,-1.905) G4(-20.955,-1.905) G5(-19.685,-1.905) G6(-18.415,-1.905) G7(-17.145,-1.905) G8(-15.875,-1.905) G9(-14.605,-1.905) G10(-13.335,-1.905) G11(-12.065,-1.905) G12(-10.795,-1.905) G13(-9.525,-1.905) G14(-8.255,-1.905) G15(-6.985,-1.905) G16(-5.715,-1.905) G17(-4.445,-1.905) G18(-3.175,-1.905) G19(-1.905,-1.905) G20(-0.635,-1.905) G21(0.635,-1.905) G22(1.905,-1.905) G23(3.175,-1.905) G24(4.445,-1.905) G25(5.715,-1.905) G26(6.985,-1.905) G27(8.255,-1.905) G28(9.525,-1.905) G29(10.795,-1.905) G30(12.065,-1.905) G31(13.335,-1.905) G32(14.605,-1.905) G33(15.875,-1.905) G34(17.145,-1.905) G35(18.415,-1.905) G36(19.685,-1.905) G37(20.955,-1.905) G38(22.225,-1.905) G39(23.495,-1.905) G40(24.765,-1.905) H1(-24.765,-3.175) H2(-23.495,-3.175) H3(-22.225,-3.175) H4(-20.955,-3.175) H5(-19.685,-3.175) H6(-18.415,-3.175) H7(-17.145,-3.175) H8(-15.875,-3.175) H9(-14.605,-3.175) H10(-13.335,-3.175) H11(-12.065,-3.175) H12(-10.795,-3.175) H13(-9.525,-3.175) H14(-8.255,-3.175) H15(-6.985,-3.175) H16(-5.715,-3.175) H17(-4.445,-3.175) H18(-3.175,-3.175) H19(-1.905,-3.175) H20(-0.635,-3.175) H21(0.635,-3.175) H22(1.905,-3.175) H23(3.175,-3.175) H24(4.445,-3.175) H25(5.715,-3.175) H26(6.985,-3.175) H27(8.255,-3.175) H28(9.525,-3.175) H29(10.795,-3.175) H30(12.065,-3.175) H31(13.335,-3.175) H32(14.605,-3.175) H33(15.875,-3.175) H34(17.145,-3.175) H35(18.415,-3.175) H36(19.685,-3.175) H37(20.955,-3.175) H38(22.225,-3.175) H39(23.495,-3.175) H40(24.765,-3.175) J1(-24.765,-4.445) J2(-23.495,-4.445) J3(-22.225,-4.445) J4(-20.955,-4.445) J5(-19.685,-4.445) J6(-18.415,-4.445) J7(-17.145,-4.445) J8(-15.875,-4.445) J9(-14.605,-4.445) J10(-13.335,-4.445) J11(-12.065,-4.445) J12(-10.795,-4.445) J13(-9.525,-4.445) J14(-8.255,-4.445) J15(-6.985,-4.445) J16(-5.715,-4.445) J17(-4.445,-4.445) J18(-3.175,-4.445) J19(-1.905,-4.445) J20(-0.635,-4.445) J21(0.635,-4.445) J22(1.905,-4.445) J23(3.175,-4.445) J24(4.445,-4.445) J25(5.715,-4.445) J26(6.985,-4.445) J27(8.255,-4.445) J28(9.525,-4.445) J29(10.795,-4.445) J30(12.065,-4.445) J31(13.335,-4.445) J32(14.605,-4.445) J33(15.875,-4.445) J34(17.145,-4.445) J35(18.415,-4.445) J36(19.685,-4.445) J37(20.955,-4.445) J38(22.225,-4.445) J39(23.495,-4.445) J40(24.765,-4.445) K1(-24.765,-5.715) K2(-23.495,-5.715) K3(-22.225,-5.715) K4(-20.955,-5.715) K5(-19.685,-5.715) K6(-18.415,-5.715) K7(-17.145,-5.715) K8(-15.875,-5.715) K9(-14.605,-5.715) K10(-13.335,-5.715) K11(-12.065,-5.715) K12(-10.795,-5.715) K13(-9.525,-5.715) K14(-8.255,-5.715) K15(-6.985,-5.715) K16(-5.715,-5.715) K17(-4.445,-5.715) K18(-3.175,-5.715) K19(-1.905,-5.715) K20(-0.635,-5.715) K21(0.635,-5.715) K22(1.905,-5.715) K23(3.175,-5.715) K24(4.445,-5.715) K25(5.715,-5.715) K26(6.985,-5.715) K27(8.255,-5.715) K28(9.525,-5.715) K29(10.795,-5.715) K30(12.065,-5.715) K31(13.335,-5.715) K32(14.605,-5.715) K33(15.875,-5.715) K34(17.145,-5.715) K35(18.415,-5.715) K36(19.685,-5.715) K37(20.955,-5.715) K38(22.225,-5.715) K39(23.495,-5.715) K40(24.765,-5.715)
  round 1.27 hole 1.27 unplated: ""(-27.189,3.05) ""(27.191,0)
Top Overlay:
  circle w0.2: c-27.189,3.05 r1
  circle w0.2: c27.191,0 r1
  region: -25.865,6.615 -27.865,6.615 -27.865,4.615 -25.865,4.615
  lines w0.2: -28.2,2.85 -28.665,2.85 -28.665,-2.85 -27.865,-2.85 -27.865,-6.615 28.765,-6.615 28.765,6.615 -27.865,6.615 -27.865,3.8 ; -24.75,-6.6 -24.75,-6.3 ; -24.75,6.3 -24.75,6.6 ; -13.32,-6.6 -13.32,-6.3 ; -13.32,6.3 -13.32,6.6 ; -0.62,-6.6 -0.62,-6.3 ; -0.62,6.3 -0.62,6.6 ; 12.08,-6.6 12.08,-6.3 ; 12.08,6.3 12.08,6.6 ; 24.78,-6.6 24.78,-6.3 ; 24.78,6.3 24.78,6.6
  text "K" at 29.233,-6.88 h0.8
  text "J" at 29.31,-5.48 h0.8
  text "F" at 29.252,-1.3 h0.8
  text "E" at 29.252,0.1 h0.8
  text "A" at 29.195,5.7 h0.8
  text "B" at 29.233,4.3 h0.8
  text "H" at 29.233,-4.08 h0.8
  text "G" at 29.214,-2.68 h0.8
  text "D" at 29.233,1.5 h0.8
  text "C" at 29.214,2.9 h0.8
  text "K" at -29.767,-6.88 h0.8
  text "J" at -29.69,-5.48 h0.8
  text "F" at -29.748,-1.3 h0.8
  text "E" at -29.748,0.1 h0.8
  text "A" at -29.805,5.7 h0.8
  text "B" at -29.767,4.3 h0.8
  text "40" at 23.952,-8.1 h1
  text "30" at 11.252,-8.1 h1
  text "20" at -1.448,-8.1 h1
  text "10" at -14.07,-8.1 h1
  text "1" at -24.919,-8.1 h1
  text "40" at 23.952,7.1 h1
  text "30" at 11.252,7.1 h1
  text "20" at -1.448,7.1 h1
  text "10" at -14.07,7.1 h1
  text "1" at -24.919,7.1 h1
  text "H" at -29.767,-4.08 h0.8
  text "G" at -29.786,-2.68 h0.8
  text "D" at -29.767,1.5 h0.8
  text "C" at -29.786,2.9 h0.8
Top Courtyard:
  lines w0.025: -29.1,-3.3 -28.3,-3.3 -28.3,-7 29.2,-7 29.2,7 -28.3,7 -28.3,3.3 -29.1,3.3 -29.1,-3.3
Top Assembly:
  drawing of 5275 lines, arcs and shapes, not listed
  text ".Designator" at -6.763,7.821 h3
3D body "ASP-134486-01_x_t.x_t": height 6.57, standoff -1.26, extent -28.727,-6.642 28.727,6.642

## ASP-134488-01 [mm] "VITA57 FMC Connector, HPC"
height 7.57
pads (402):
  round 0.64 smd mask+0.05: A1(24.765,5.715) A2(23.495,5.715) A3(22.225,5.715) A4(20.955,5.715) A5(19.685,5.715) A6(18.415,5.715) A7(17.145,5.715) A8(15.875,5.715) A9(14.605,5.715) A10(13.335,5.715) A11(12.065,5.715) A12(10.795,5.715) A13(9.525,5.715) A14(8.255,5.715) A15(6.985,5.715) A16(5.715,5.715) A17(4.445,5.715) A18(3.175,5.715) A19(1.905,5.715) A20(0.635,5.715) A21(-0.635,5.715) A22(-1.905,5.715) A23(-3.175,5.715) A24(-4.445,5.715) A25(-5.715,5.715) A26(-6.985,5.715) A27(-8.255,5.715) A28(-9.525,5.715) A29(-10.795,5.715) A30(-12.065,5.715) A31(-13.335,5.715) A32(-14.605,5.715) A33(-15.875,5.715) A34(-17.145,5.715) A35(-18.415,5.715) A36(-19.685,5.715) A37(-20.955,5.715) A38(-22.225,5.715) A39(-23.495,5.715) A40(-24.765,5.715) B1(24.765,4.445) B2(23.495,4.445) B3(22.225,4.445) B4(20.955,4.445) B5(19.685,4.445) B6(18.415,4.445) B7(17.145,4.445) B8(15.875,4.445) B9(14.605,4.445) B10(13.335,4.445) B11(12.065,4.445) B12(10.795,4.445) B13(9.525,4.445) B14(8.255,4.445) B15(6.985,4.445) B16(5.715,4.445) B17(4.445,4.445) B18(3.175,4.445) B19(1.905,4.445) B20(0.635,4.445) B21(-0.635,4.445) B22(-1.905,4.445) B23(-3.175,4.445) B24(-4.445,4.445) B25(-5.715,4.445) B26(-6.985,4.445) B27(-8.255,4.445) B28(-9.525,4.445) B29(-10.795,4.445) B30(-12.065,4.445) B31(-13.335,4.445) B32(-14.605,4.445) B33(-15.875,4.445) B34(-17.145,4.445) B35(-18.415,4.445) B36(-19.685,4.445) B37(-20.955,4.445) B38(-22.225,4.445) B39(-23.495,4.445) B40(-24.765,4.445) C1(24.765,3.175) C2(23.495,3.175) C3(22.225,3.175) C4(20.955,3.175) C5(19.685,3.175) C6(18.415,3.175) C7(17.145,3.175) C8(15.875,3.175) C9(14.605,3.175) C10(13.335,3.175) C11(12.065,3.175) C12(10.795,3.175) C13(9.525,3.175) C14(8.255,3.175) C15(6.985,3.175) C16(5.715,3.175) C17(4.445,3.175) C18(3.175,3.175) C19(1.905,3.175) C20(0.635,3.175) C21(-0.635,3.175) C22(-1.905,3.175) C23(-3.175,3.175) C24(-4.445,3.175) C25(-5.715,3.175) C26(-6.985,3.175) C27(-8.255,3.175) C28(-9.525,3.175) C29(-10.795,3.175) C30(-12.065,3.175) C31(-13.335,3.175) C32(-14.605,3.175) C33(-15.875,3.175) C34(-17.145,3.175) C35(-18.415,3.175) C36(-19.685,3.175) C37(-20.955,3.175) C38(-22.225,3.175) C39(-23.495,3.175) C40(-24.765,3.175) D1(24.765,1.905) D2(23.495,1.905) D3(22.225,1.905) D4(20.955,1.905) D5(19.685,1.905) D6(18.415,1.905) D7(17.145,1.905) D8(15.875,1.905) D9(14.605,1.905) D10(13.335,1.905) D11(12.065,1.905) D12(10.795,1.905) D13(9.525,1.905) D14(8.255,1.905) D15(6.985,1.905) D16(5.715,1.905) D17(4.445,1.905) D18(3.175,1.905) D19(1.905,1.905) D20(0.635,1.905) D21(-0.635,1.905) D22(-1.905,1.905) D23(-3.175,1.905) D24(-4.445,1.905) D25(-5.715,1.905) D26(-6.985,1.905) D27(-8.255,1.905) D28(-9.525,1.905) D29(-10.795,1.905) D30(-12.065,1.905) D31(-13.335,1.905) D32(-14.605,1.905) D33(-15.875,1.905) D34(-17.145,1.905) D35(-18.415,1.905) D36(-19.685,1.905) D37(-20.955,1.905) D38(-22.225,1.905) D39(-23.495,1.905) D40(-24.765,1.905) E1(24.765,0.635) E2(23.495,0.635) E3(22.225,0.635) E4(20.955,0.635) E5(19.685,0.635) E6(18.415,0.635) E7(17.145,0.635) E8(15.875,0.635) E9(14.605,0.635) E10(13.335,0.635) E11(12.065,0.635) E12(10.795,0.635) E13(9.525,0.635) E14(8.255,0.635) E15(6.985,0.635) E16(5.715,0.635) E17(4.445,0.635) E18(3.175,0.635) E19(1.905,0.635) E20(0.635,0.635) E21(-0.635,0.635) E22(-1.905,0.635) E23(-3.175,0.635) E24(-4.445,0.635) E25(-5.715,0.635) E26(-6.985,0.635) E27(-8.255,0.635) E28(-9.525,0.635) E29(-10.795,0.635) E30(-12.065,0.635) E31(-13.335,0.635) E32(-14.605,0.635) E33(-15.875,0.635) E34(-17.145,0.635) E35(-18.415,0.635) E36(-19.685,0.635) E37(-20.955,0.635) E38(-22.225,0.635) E39(-23.495,0.635) E40(-24.765,0.635) F1(24.765,-0.635) F2(23.495,-0.635) F3(22.225,-0.635) F4(20.955,-0.635) F5(19.685,-0.635) F6(18.415,-0.635) F7(17.145,-0.635) F8(15.875,-0.635) F9(14.605,-0.635) F10(13.335,-0.635) F11(12.065,-0.635) F12(10.795,-0.635) F13(9.525,-0.635) F14(8.255,-0.635) F15(6.985,-0.635) F16(5.715,-0.635) F17(4.445,-0.635) F18(3.175,-0.635) F19(1.905,-0.635) F20(0.635,-0.635) F21(-0.635,-0.635) F22(-1.905,-0.635) F23(-3.175,-0.635) F24(-4.445,-0.635) F25(-5.715,-0.635) F26(-6.985,-0.635) F27(-8.255,-0.635) F28(-9.525,-0.635) F29(-10.795,-0.635) F30(-12.065,-0.635) F31(-13.335,-0.635) F32(-14.605,-0.635) F33(-15.875,-0.635) F34(-17.145,-0.635) F35(-18.415,-0.635) F36(-19.685,-0.635) F37(-20.955,-0.635) F38(-22.225,-0.635) F39(-23.495,-0.635) F40(-24.765,-0.635) G1(24.765,-1.905) G2(23.495,-1.905) G3(22.225,-1.905) G4(20.955,-1.905) G5(19.685,-1.905) G6(18.415,-1.905) G7(17.145,-1.905) G8(15.875,-1.905) G9(14.605,-1.905) G10(13.335,-1.905) G11(12.065,-1.905) G12(10.795,-1.905) G13(9.525,-1.905) G14(8.255,-1.905) G15(6.985,-1.905) G16(5.715,-1.905) G17(4.445,-1.905) G18(3.175,-1.905) G19(1.905,-1.905) G20(0.635,-1.905) G21(-0.635,-1.905) G22(-1.905,-1.905) G23(-3.175,-1.905) G24(-4.445,-1.905) G25(-5.715,-1.905) G26(-6.985,-1.905) G27(-8.255,-1.905) G28(-9.525,-1.905) G29(-10.795,-1.905) G30(-12.065,-1.905) G31(-13.335,-1.905) G32(-14.605,-1.905) G33(-15.875,-1.905) G34(-17.145,-1.905) G35(-18.415,-1.905) G36(-19.685,-1.905) G37(-20.955,-1.905) G38(-22.225,-1.905) G39(-23.495,-1.905) G40(-24.765,-1.905) H1(24.765,-3.175) H2(23.495,-3.175) H3(22.225,-3.175) H4(20.955,-3.175) H5(19.685,-3.175) H6(18.415,-3.175) H7(17.145,-3.175) H8(15.875,-3.175) H9(14.605,-3.175) H10(13.335,-3.175) H11(12.065,-3.175) H12(10.795,-3.175) H13(9.525,-3.175) H14(8.255,-3.175) H15(6.985,-3.175) H16(5.715,-3.175) H17(4.445,-3.175) H18(3.175,-3.175) H19(1.905,-3.175) H20(0.635,-3.175) H21(-0.635,-3.175) H22(-1.905,-3.175) H23(-3.175,-3.175) H24(-4.445,-3.175) H25(-5.715,-3.175) H26(-6.985,-3.175) H27(-8.255,-3.175) H28(-9.525,-3.175) H29(-10.795,-3.175) H30(-12.065,-3.175) H31(-13.335,-3.175) H32(-14.605,-3.175) H33(-15.875,-3.175) H34(-17.145,-3.175) H35(-18.415,-3.175) H36(-19.685,-3.175) H37(-20.955,-3.175) H38(-22.225,-3.175) H39(-23.495,-3.175) H40(-24.765,-3.175) J1(24.765,-4.445) J2(23.495,-4.445) J3(22.225,-4.445) J4(20.955,-4.445) J5(19.685,-4.445) J6(18.415,-4.445) J7(17.145,-4.445) J8(15.875,-4.445) J9(14.605,-4.445) J10(13.335,-4.445) J11(12.065,-4.445) J12(10.795,-4.445) J13(9.525,-4.445) J14(8.255,-4.445) J15(6.985,-4.445) J16(5.715,-4.445) J17(4.445,-4.445) J18(3.175,-4.445) J19(1.905,-4.445) J20(0.635,-4.445) J21(-0.635,-4.445) J22(-1.905,-4.445) J23(-3.175,-4.445) J24(-4.445,-4.445) J25(-5.715,-4.445) J26(-6.985,-4.445) J27(-8.255,-4.445) J28(-9.525,-4.445) J29(-10.795,-4.445) J30(-12.065,-4.445) J31(-13.335,-4.445) J32(-14.605,-4.445) J33(-15.875,-4.445) J34(-17.145,-4.445) J35(-18.415,-4.445) J36(-19.685,-4.445) J37(-20.955,-4.445) J38(-22.225,-4.445) J39(-23.495,-4.445) J40(-24.765,-4.445) K1(24.765,-5.715) K2(23.495,-5.715) K3(22.225,-5.715) K4(20.955,-5.715) K5(19.685,-5.715) K6(18.415,-5.715) K7(17.145,-5.715) K8(15.875,-5.715) K9(14.605,-5.715) K10(13.335,-5.715) K11(12.065,-5.715) K12(10.795,-5.715) K13(9.525,-5.715) K14(8.255,-5.715) K15(6.985,-5.715) K16(5.715,-5.715) K17(4.445,-5.715) K18(3.175,-5.715) K19(1.905,-5.715) K20(0.635,-5.715) K21(-0.635,-5.715) K22(-1.905,-5.715) K23(-3.175,-5.715) K24(-4.445,-5.715) K25(-5.715,-5.715) K26(-6.985,-5.715) K27(-8.255,-5.715) K28(-9.525,-5.715) K29(-10.795,-5.715) K30(-12.065,-5.715) K31(-13.335,-5.715) K32(-14.605,-5.715) K33(-15.875,-5.715) K34(-17.145,-5.715) K35(-18.415,-5.715) K36(-19.685,-5.715) K37(-20.955,-5.715) K38(-22.225,-5.715) K39(-23.495,-5.715) K40(-24.765,-5.715)
  round 1.27 hole 1.27 unplated: ""(-27.191,-3.05) ""(27.191,0)
Top Overlay:
  drawing of 60 lines, arcs and shapes, not listed
  text "K" at 29.433,-6.88 h0.8
  text "J" at 29.51,-5.48 h0.8
  text "F" at 29.452,-1.3 h0.8
  text "E" at 29.452,0.1 h0.8
  text "A" at 29.395,5.7 h0.8
  text "B" at 29.433,4.3 h0.8
  text "H" at 29.433,-4.08 h0.8
  text "G" at 29.414,-2.68 h0.8
  text "D" at 29.433,1.5 h0.8
  text "C" at 29.414,2.9 h0.8
  text "K" at -29.767,-6.88 h0.8
  text "J" at -29.69,-5.48 h0.8
  text "F" at -29.748,-1.3 h0.8
  text "E" at -29.748,0.1 h0.8
  text "A" at -29.805,5.7 h0.8
  text "B" at -29.767,4.3 h0.8
  text "40" at -25.578,-9.05 h1
  text "1" at 24.611,8.45 h1
  text "40" at -25.578,8.45 h1
  text "H" at -29.767,-4.08 h0.8
  text "G" at -29.786,-2.68 h0.8
  text "D" at -29.767,1.5 h0.8
  text "C" at -29.786,2.9 h0.8
  text "1" at 24.611,-9.05 h1
Top Courtyard:
  lines w0.025: -28.3,-7.75 28.35,-7.75 28.35,-1.2 29.2,-1.2 29.2,1.2 28.35,1.2 28.35,7.75 -28.3,7.75 -28.3,-7.75
Top Assembly:
  drawing of 9051 lines, arcs and shapes, not listed
  text ".Designator" at -6.763,8.071 h3
3D body "ASP-134488-01.x_t": height 7.13, standoff -1.25, extent -27.889,-7.341 28.778,7.341